# EAGLE library part MA04-2J (library joakim-old)
PIN HEADER
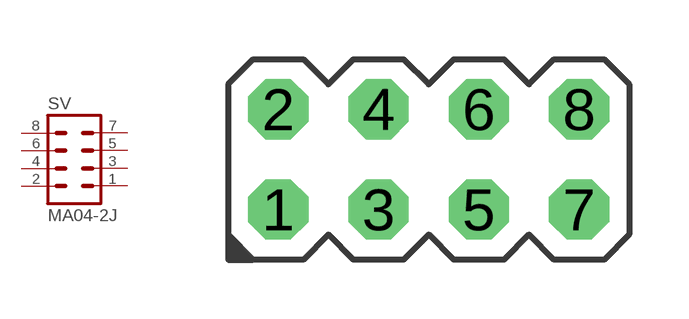
[diagram p9: symbol with the pads of MA04-2J; footprint MA04-2J]

Designator prefix SV

## MA04-2J (OC_FARNELL: unknown; OC_NEWARK: unknown)  [MA04-2J]
1  1  pas
2  2  pas
3  3  pas
4  4  pas
5  5  pas
6  6  pas
7  7  pas
8  8  pas

## Footprint MA04-2J (pad centres in mm)
PIN HEADER
drill 1.016 octagon: 1 -3.81,-1.27; 2 -3.81,1.27; 3 -1.27,-1.27; 4 -1.27,1.27; 5 1.27,-1.27; 6 1.27,1.27; 7 3.81,-1.27; 8 3.81,1.27